# Altium footprint library MICROCHIP_PKG_TSOT-5LD-PL-1.PcbLib: 1 footprints
Each footprint in its own frame and in the unit in brackets; x right, y up, seen from the top. Pads: shape width x height; smd on the part's side, far side on the other; paste and mask are expansions set on the pad; w line width, h text height; cw(c..) or ccw(c..) is an arc to the next point about the centre after c.
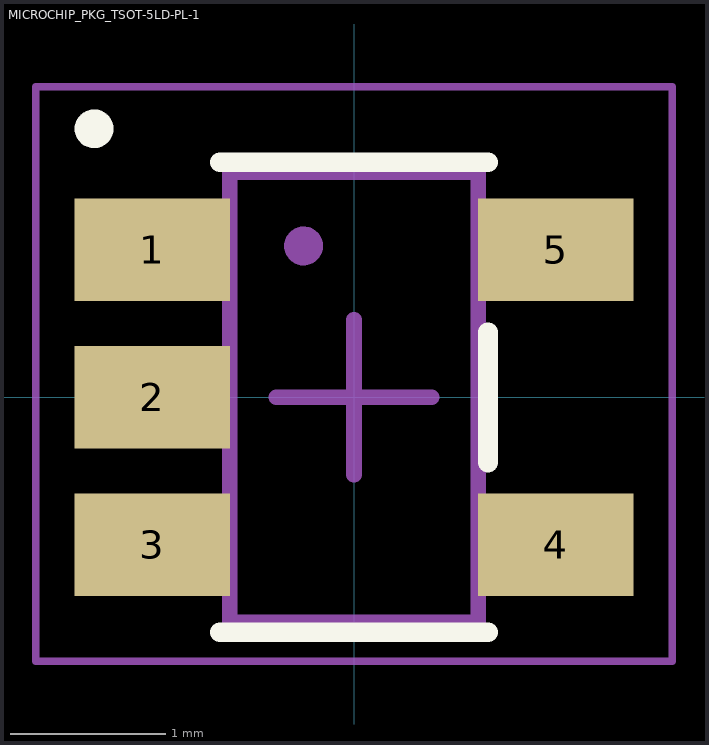
[diagram p0: the footprint, top view; thin cyan lines are the x and y axes]

## MICROCHIP_PKG_TSOT-5LD-PL-1 [mm]
height 0.9
pads (5):
  rect 1x0.66 smd: 1(-1.3,0.95) 2(-1.3,0) 3(-1.3,-0.95) 4(1.3,-0.95) 5(1.3,0.95)
Top Overlay:
  circle w0.125: c-1.675,1.73 r0.062
  lines w0.127: -0.864,-1.513 0.864,-1.513 ; -0.864,1.513 0.864,1.513 ; 0.864,-0.42 0.864,0.42
Mechanical 13:
  circle w0.125: c-0.325,0.975 r0.062
  lines w0.1: -0.8,-1.45 -0.8,1.45 0.8,1.45 0.8,-1.45 -0.8,-1.45
Mechanical 15:
  lines w0.05: -2.05,-1.7 -2.05,2 2.05,2 2.05,-1.7 -2.05,-1.7
  lines w0.1: -0.5,0 0.5,0 ; 0,-0.5 0,0.5
3D body "SOT23127P600-8N.step": height 0.9, standoff 0, extent -1.4,-1.45 1.4,1.45